# Altium footprint library CHIP-Library.PcbLib: 345 footprints (part 14 of 22)
Each footprint in its own frame and in the unit in brackets; x right, y up, seen from the top. Pads: shape width x height; smd on the part's side, far side on the other; paste and mask are expansions set on the pad; w line width, h text height; cw(c..) or ccw(c..) is an arc to the next point about the centre after c.
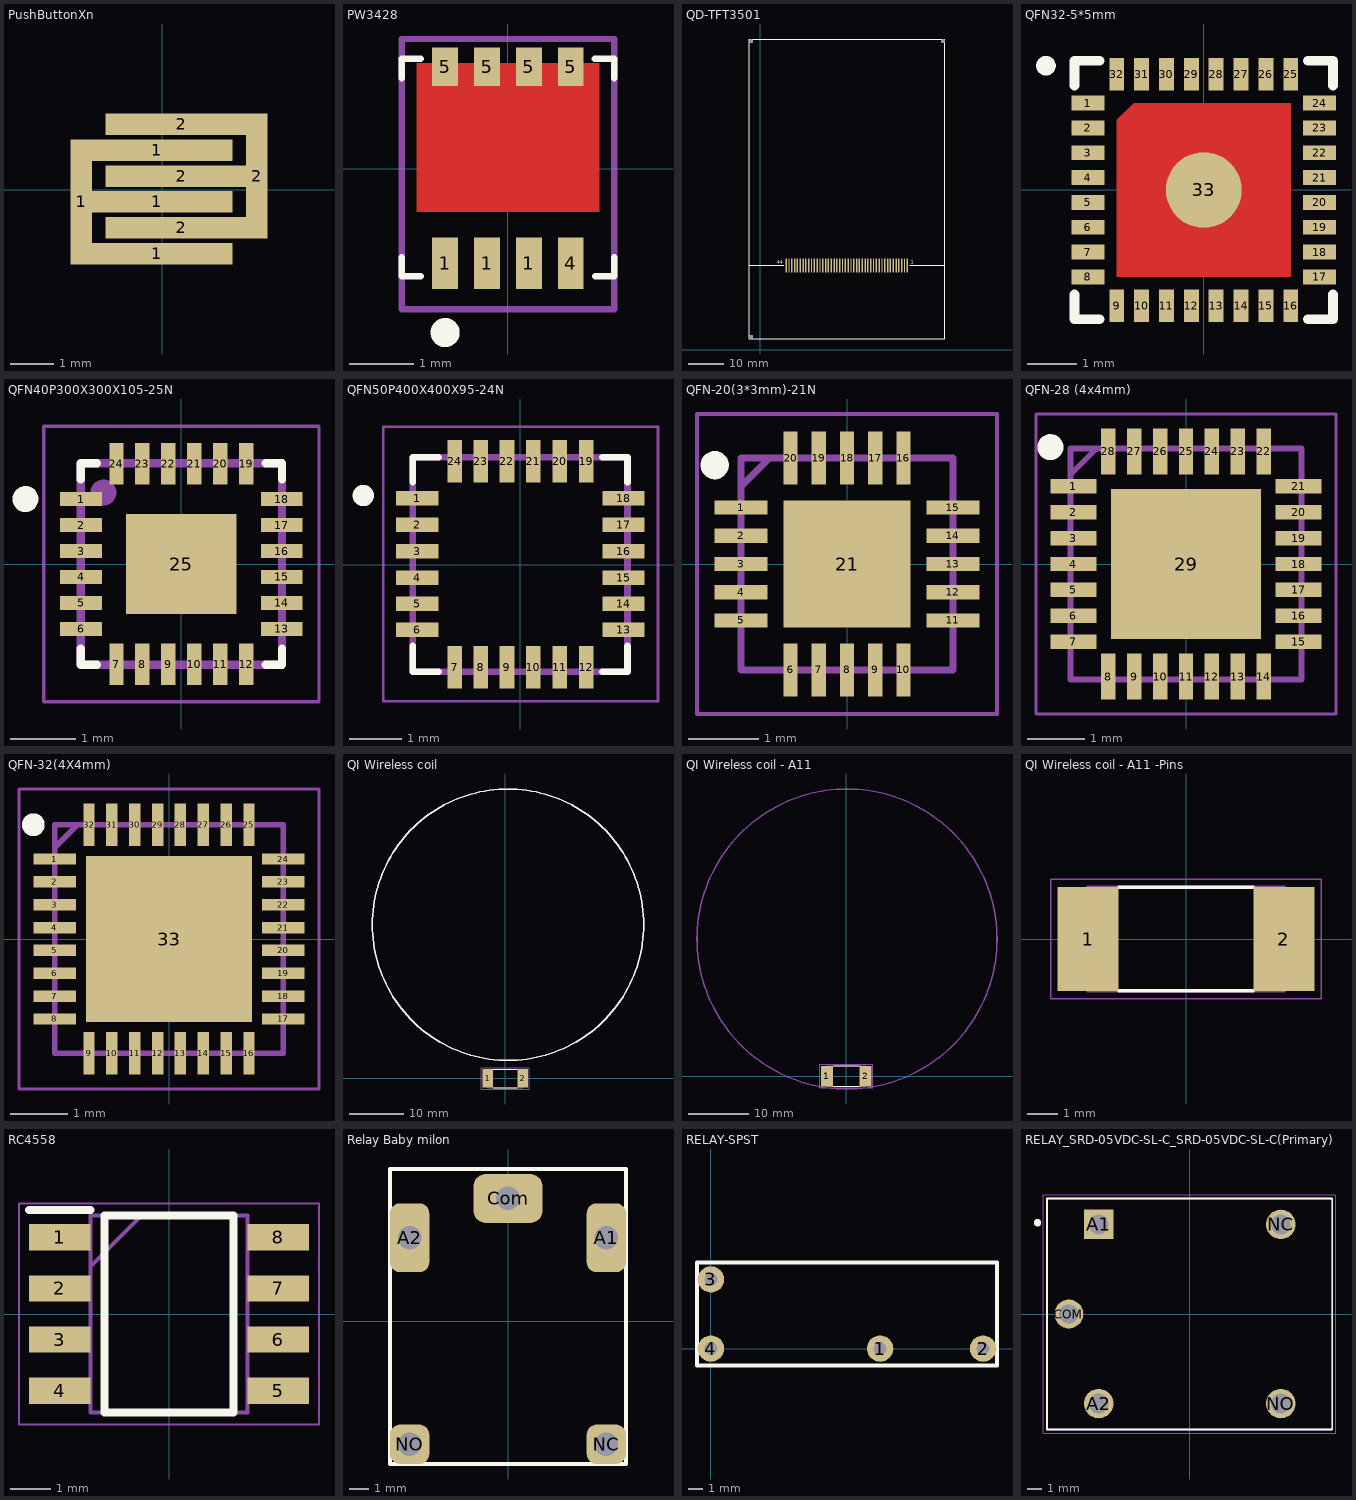
[diagram p13: the footprints below, top view; thin cyan lines are the x and y axes]

## PushButtonXn [mm]
pads (8):
  rect 0.5x2.9 smd: 1(-1.88,-0.285) 2(2.184,0.315)
  rect 3.5x0.5 smd: 1(-0.127,-1.486) 1(-0.127,-0.286) 1(-0.127,0.914) 2(0.432,-0.886) 2(0.432,0.314) 2(0.432,1.514)

## PW3428 [mm] "PDFN3X3-8"
pads (8):
  rect 0.4x0.8 smd: 1(-0.975,-1.465) 1(-0.325,-1.465) 1(0.325,-1.465) 4(0.975,-1.465)
  rect 0.4x0.6 smd: 5(-0.975,1.585) 5(-0.325,1.585) 5(0.325,1.585) 5(0.975,1.585)
Top Layer:
  region: -1.415,-0.665 1.415,-0.665 1.415,1.635 -1.415,1.635
Top Overlay:
  circle w0.25: c-0.975,-2.54 r0.1
  lines w0.1: -1.65,-1.368 -1.65,-1.668 -1.35,-1.668 ; -1.65,1.406 -1.65,1.706 -1.35,1.706 ; 1.35,1.706 1.65,1.706 1.65,1.406 ; 1.351,-1.668 1.651,-1.668 1.651,-1.368
Top Paste:
  region: 0.125,-0.664 1.415,-0.664 1.415,1.636 0.125,1.636
  region: -1.415,-0.665 -0.125,-0.665 -0.125,1.635 -1.415,1.635
Top Solder:
  region: 0.125,-0.664 1.415,-0.664 1.415,1.636 0.125,1.636
  region: -1.415,-0.665 -0.125,-0.665 -0.125,1.635 -1.415,1.635
Mechanical 15:
  lines w0.1: -1.65,-2.176 1.65,-2.176 1.65,2.015 -1.65,2.015 -1.65,-2.176
3D body "CSD17575Q3.STEP": height 1.1, standoff 0, extent -1.65,-1.65 1.65,1.65

## QD-TFT3501 [mm] "3.5inch TFT LCD"
pads (48):
  rect 0.4x4 smd: 1(40.905,23.975) 1(41.705,23.975) 3(40.105,23.975) 4(39.305,23.975) 5(38.505,23.975) 6(37.705,23.975) 7(36.905,23.975) 8(36.105,23.975) 9(35.305,23.975) 10(34.505,23.975) 11(33.705,23.975) 12(32.905,23.975) 13(32.105,23.975) 14(31.305,23.975) 15(30.505,23.975) 16(29.705,23.975) 17(28.905,23.975) 18(28.105,23.975) 19(27.305,23.975) 20(26.505,23.975) 21(25.705,23.975) 22(24.905,23.975) 23(24.105,23.975) 24(23.305,23.975) 25(22.505,23.975) 26(21.705,23.975) 27(20.905,23.975) 28(20.105,23.975) 29(19.305,23.975) 30(18.505,23.975) 31(17.705,23.975) 32(16.905,23.975) 33(16.105,23.975) 34(15.305,23.975) 35(14.505,23.975) 36(13.705,23.975) 37(12.905,23.975) 38(12.105,23.975) 39(11.305,23.975) 40(10.505,23.975) 41(9.705,23.975) 42(8.905,23.975) 43(8.105,23.975) 44(7.305,23.975) 44(7.305,23.975)
  round 1.2 hole 1.2 unplated mask+0: 9(-2.675,3.675) 9(-2.675,87.635) 9(51.825,87.635)
Top Overlay:
  lines w0.254: -3.147,23.975 6.604,23.975 ; 42.418,23.975 52.297,23.975 ; -3.175,3.175 -3.175,88.135 52.325,88.135 52.325,3.175 -3.175,3.175
  text "1" at 42.672,24.384 h1.02
  text "44" at 4.572,24.384 h1.02

## QFN32-5*5mm [mm]
pads (34):
  rect 0.66x0.3 smd mask+0.03: 1(-2.33,1.75) 2(-2.33,1.25) 3(-2.33,0.75) 4(-2.33,0.25) 5(-2.33,-0.25) 6(-2.33,-0.75) 7(-2.33,-1.25) 8(-2.33,-1.75) 17(2.33,-1.75) 18(2.33,-1.25) 19(2.33,-0.75) 20(2.33,-0.25) 21(2.33,0.25) 22(2.33,0.75) 23(2.33,1.25) 24(2.33,1.75)
  rect 0.3x0.66 smd mask+0.03: 9(-1.75,-2.33) 10(-1.25,-2.33) 11(-0.75,-2.33) 12(-0.25,-2.33) 13(0.25,-2.33) 14(0.75,-2.33) 15(1.25,-2.33) 16(1.75,-2.33) 25(1.75,2.33) 26(1.25,2.33) 27(0.75,2.33) 28(0.25,2.33) 29(-0.25,2.33) 30(-0.75,2.33) 31(-1.25,2.33) 32(-1.75,2.33)
  round 1.524 smd: 33(0,0)
  round 0.4 on Top Overlay: ""(-3.175,2.5)
Top Layer:
  region: -1.412,1.75 -1.75,1.412 -1.75,-1.75 1.75,-1.75 1.75,1.75
Top Overlay:
  lines w0.2: -2.6,-2.1 -2.6,-2.6 -2.1,-2.6 ; -2.6,2.1 -2.6,2.6 -2.1,2.6 ; 2.1,-2.6 2.6,-2.6 2.6,-2.1 ; 2.1,2.6 2.6,2.6 2.6,2.1
Top Paste:
  rectangle: -1.131,-1.462 -0.381,-0.762
  rectangle: 0.381,-1.462 1.131,-0.762
  rectangle: 0.381,-0.319 1.131,0.381
  rectangle: -1.131,-0.319 -0.381,0.381
  rectangle: 0.381,0.762 1.131,1.462
  rectangle: -1.131,0.762 -0.381,1.462
3D body: height 0.75, standoff 0, extent -2.5,-2.5 2.5,2.5

## QFN40P300X300X105-25N [mm]
pads (25):
  rect 0.64x0.22 smd: 1(-1.545,1) 2(-1.545,0.6) 3(-1.545,0.2) 4(-1.545,-0.2) 5(-1.545,-0.6) 6(-1.545,-1) 13(1.545,-1) 14(1.545,-0.6) 15(1.545,-0.2) 16(1.545,0.2) 17(1.545,0.6) 18(1.545,1)
  rect 0.22x0.64 smd: 7(-1,-1.545) 8(-0.6,-1.545) 9(-0.2,-1.545) 10(0.2,-1.545) 11(0.6,-1.545) 12(1,-1.545) 19(1,1.545) 20(0.6,1.545) 21(0.2,1.545) 22(-0.2,1.545) 23(-0.6,1.545) 24(-1,1.545)
  rect 1.7x1.54 smd: 25(0,0)
Top Overlay:
  circle w0.2: c-2.4,1 r0.1
  lines w0.127: -1.55,-1.3 -1.55,-1.55 -1.3,-1.55 ; -1.55,1.3 -1.55,1.55 -1.3,1.55 ; 1.3,-1.55 1.55,-1.55 1.55,-1.3 ; 1.3,1.55 1.55,1.55 1.55,1.3
Top Paste:
  region: -0.692,0.61 -0.08,0.61 -0.08,0.08 -0.692,0.08
  region: 0.08,0.61 0.69,0.61 0.69,0.08 0.08,0.08
  region: -0.692,-0.08 -0.08,-0.08 -0.08,-0.612 -0.692,-0.612
  region: 0.08,-0.08 0.69,-0.08 0.69,-0.612 0.08,-0.612
Mechanical 1:
  circle w0.2: c-1.2,1.1 r0.1
  lines w0.127: -1.55,-1.55 1.55,-1.55 1.55,1.55 -1.55,1.55 -1.55,-1.55
Mechanical 4:
  lines w0.05: -2.12,-2.12 2.12,-2.12 2.12,2.12 -2.12,2.12 -2.12,-2.12
3D body "User Library-MPU9250.step": height 1, standoff -0.05, extent -1.51,-1.51 1.51,1.51

## QFN50P400X400X95-24N [mil]
pads (24):
  rect 32x11 smd: 1(-77.56,50) 2(-77.56,30) 3(-77.56,10) 4(-77.56,-9.84) 5(-77.56,-29.53) 6(-77.56,-49.21) 13(78,-49.21) 14(78,-29.53) 15(78,-9.84) 16(78,10) 17(78,30) 18(78,50)
  rect 11x32 smd: 7(-49.21,-77.56) 8(-29.53,-77.56) 9(-9.84,-77.56) 10(10,-77.56) 11(30,-77.56) 12(50,-77.56) 19(50,78) 20(30,78) 21(10,78) 22(-9.84,78) 23(-29.53,78) 24(-49.21,78)
Top Overlay:
  circle w8: c-118.11,52 r4
  lines w5: -80.71,-61.42 -80.71,-80.71 -61.42,-80.71 ; -80.71,62 -80.71,81 -61.42,81 ; 62,-80.71 81,-80.71 81,-61.42 ; 62,81 81,81 81,62
Mechanical 4:
Mechanical 16:
  lines w5: -80.71,-80.71 -80.71,81 81,81 81,-80.71 -80.71,-80.71
Mechanical 27:
  lines w2: -103.15,-103.15 -103.15,104 104,104 104,-103.15 -103.15,-103.15

## QFN-20(3*3mm)-21N [mm]
pads (21):
  rect 0.75x0.2 smd: 1(-1.5,0.8) 2(-1.5,0.4) 3(-1.5,0) 4(-1.5,-0.4) 5(-1.5,-0.8) 11(1.5,-0.8) 12(1.5,-0.4) 13(1.5,0) 14(1.5,0.4) 15(1.5,0.8)
  rect 0.2x0.75 smd: 6(-0.8,-1.5) 7(-0.4,-1.5) 8(0,-1.5) 9(0.4,-1.5) 10(0.8,-1.5) 16(0.8,1.5) 17(0.4,1.5) 18(0,1.5) 19(-0.4,1.5) 20(-0.8,1.5)
  rect 1.8x1.8 smd: 21(0,0)
Top Overlay:
  circle w0.2: c-1.875,1.4 r0.1
Mechanical 15:
  lines w0.1: -1.5,1.1 -1.1,1.5 ; -1.5,-1.5 1.5,-1.5 1.5,1.5 -1.5,1.5 -1.5,-1.5
Mechanical 20:
  lines w0.05: -2.125,-2.125 2.125,-2.125 2.125,2.125 -2.125,2.125 -2.125,-2.125
3D body "QFN-20(3X3mm).stp": height 0.6, standoff 0, extent -1.55,-1.55 1.55,1.55

## QFN-28 (4x4mm) [mm]
pads (29):
  rect 0.8x0.25 smd: 1(-1.95,1.35) 2(-1.95,0.9) 3(-1.95,0.45) 4(-1.95,0) 5(-1.95,-0.45) 6(-1.95,-0.9) 7(-1.95,-1.35) 15(1.95,-1.35) 16(1.95,-0.9) 17(1.95,-0.45) 18(1.95,0) 19(1.95,0.45) 20(1.95,0.9) 21(1.95,1.35)
  rect 0.25x0.8 smd: 8(-1.35,-1.95) 9(-0.9,-1.95) 10(-0.45,-1.95) 11(0,-1.95) 12(0.45,-1.95) 13(0.9,-1.95) 14(1.35,-1.95) 22(1.35,1.95) 23(0.9,1.95) 24(0.45,1.95) 25(0,1.95) 26(-0.45,1.95) 27(-0.9,1.95) 28(-1.35,1.95)
  rect 2.6x2.6 smd: 29(0,0)
Top Overlay:
  circle w0.225: c-2.351,2.025 r0.112
Mechanical 15:
  lines w0.1: -2,1.55 -1.55,2 ; -2,-2 -2,2 2,2 2,-2 -2,-2
Mechanical 20:
  lines w0.05: -2.6,-2.6 -2.6,2.6 2.6,2.6 2.6,-2.6 -2.6,-2.6
3D body "QFN-28(4x4mm).stp": height 0.9, standoff 0, extent -2.05,-2.05 2.05,2.05

## QFN-32(4X4mm) [mm]
pads (33):
  rect 0.75x0.2 smd: 1(-2,1.4) 2(-2,1) 3(-2,0.6) 4(-2,0.2) 5(-2,-0.2) 6(-2,-0.6) 7(-2,-1) 8(-2,-1.4) 17(2,-1.4) 18(2,-1) 19(2,-0.6) 20(2,-0.2) 21(2,0.2) 22(2,0.6) 23(2,1) 24(2,1.4)
  rect 0.2x0.75 smd: 9(-1.4,-2) 10(-1,-2) 11(-0.6,-2) 12(-0.2,-2) 13(0.2,-2) 14(0.6,-2) 15(1,-2) 16(1.4,-2) 25(1.4,2) 26(1,2) 27(0.6,2) 28(0.2,2) 29(-0.2,2) 30(-0.6,2) 31(-1,2) 32(-1.4,2)
  rect 2.9x2.9 smd: 33(0,0)
Top Overlay:
  circle w0.2: c-2.375,2 r0.1
Mechanical 15:
  lines w0.1: -2,1.6 -1.6,2 ; -2,-2 -2,2 2,2 2,-2 -2,-2
Mechanical 20:
  lines w0.05: -2.625,-2.625 -2.625,2.625 2.625,2.625 2.625,-2.625 -2.625,-2.625

## QI Wireless coil [mm]
pads (2):
  rect 2x3.42 smd: 1(-3.22,0) 2(3.22,0)
Top Overlay:
  circle w0.254: c0.508,28.321 r25
  lines w0.127: -2.2,-1.7 2.2,-1.7 ; -2.2,1.7 2.2,1.7
Top Courtyard:
  circle w0.254: c0.508,28.321 r25
Mechanical 13:
  lines w0.127: -3.22,-1.7 3.22,-1.7 3.22,1.7 -3.22,1.7 -3.22,-1.7
Mechanical 15:
  lines w0.05: -4.445,-1.958 4.445,-1.958 4.445,1.958 -4.445,1.958 -4.445,-1.958
3D body "QI WIRELESS CHARGER COIL.STEP": height 2.72, standoff 0.01, extent -32.215,-4.783 32.052,59.483

## QI Wireless coil - A11 [mm]
pads (2):
  rect 2x3.42 smd: 1(-3.22,0) 2(3.22,0)
Top Overlay:
  lines w0.127: -2.2,-1.7 2.2,-1.7 ; -2.2,1.7 2.2,1.7
Top Courtyard:
  circle w0.254: c0.127,22.86 r25
Mechanical 13:
  lines w0.127: -3.22,-1.7 3.22,-1.7 3.22,1.7 -3.22,1.7 -3.22,-1.7
Mechanical 15:
  lines w0.05: -4.445,-1.958 4.445,-1.958 4.445,1.958 -4.445,1.958 -4.445,-1.958
3D body "QI WIRELESS CHARGER COIL.STEP": height 2.72, standoff 0.01, extent -32.157,-8.488 32.11,55.779

## QI Wireless coil - A11 -Pins [mm]
pads (2):
  rect 2x3.42 smd: 1(-3.22,0) 2(3.22,0)
Top Overlay:
  lines w0.127: -2.2,-1.7 2.2,-1.7 ; -2.2,1.7 2.2,1.7
Mechanical 13:
  lines w0.127: -3.22,-1.7 3.22,-1.7 3.22,1.7 -3.22,1.7 -3.22,-1.7
Mechanical 15:
  lines w0.05: -4.445,-1.958 4.445,-1.958 4.445,1.958 -4.445,1.958 -4.445,-1.958

## RC4558 [mm]
pads (8):
  rect 1.525x0.65 smd: 1(-2.712,1.905) 2(-2.712,0.635) 3(-2.712,-0.635) 4(-2.712,-1.905) 5(2.712,-1.905) 6(2.712,-0.635) 7(2.712,0.635) 8(2.712,1.905)
Top Overlay:
  lines w0.2: -3.475,2.58 -1.95,2.58 ; -1.6,-2.45 1.6,-2.45 1.6,2.45 -1.6,2.45 -1.6,-2.45
Mechanical 13:
  lines w0.1: -1.95,1.18 -0.68,2.45 ; -1.95,-2.45 1.95,-2.45 1.95,2.45 -1.95,2.45 -1.95,-2.45
Mechanical 15:
  lines w0.05: -3.725,-2.75 3.725,-2.75 3.725,2.75 -3.725,2.75 -3.725,-2.75
3D body "FR9886SOGTR.stp": height 1.75, standoff 0, extent -3,-2.45 3,2.45

## Relay Baby milon [mm] "relay baby milon 12v"
height 1.91
pads (5):
  rrect50% 2x3.5 hole 1.2: A1(5,4.25) A2(-5,4.25)
  rrect50% 3.5x2.5 hole 1.2: Com(0,6.25)
  rrect50% 2x2 hole 1.2: NC(5,-6.25) NO(-5,-6.25)
Top Overlay:
  lines w0.2: -6,-7.25 -6,7.75 6,7.75 6,-7.25 -6,-7.25
3D body "User Library-T74 4181.STEP": height 13.71, standoff -3.89, extent -6.131,-7.583 6.169,8.117

## RELAY-SPST [mm]
height 0.55
pads (4):
  round 1.8 hole 0.9: 1(11.5,0) 2(18.5,0) 3(0,4.7) 4(0,0)
Top Overlay:
  lines w0.254: -0.95,-1.15 19.45,-1.15 19.45,5.85 -0.95,5.85 -0.95,-1.15
3D body "role.STEP": height 14.91, standoff -3.39, extent -0.979,-1.187 19.521,6.013

## RELAY_SRD-05VDC-SL-C_SRD-05VDC-SL-C(Primary) [mm]
pads (5):
  rect 1.98x1.98 hole 1.32: A1(-6.1,6)
  round 1.98 hole 1.32: A2(-6.1,-6) NC(6.1,6) NO(6.1,-6)
  round 1.935 hole 1.29: COM(-8.1,0)
Top Overlay:
  circle w0.3: c-10.2,6.119 r0.1
  lines w0.127: -9.55,-7.75 9.55,-7.75 9.55,7.75 -9.55,7.75 -9.55,-7.75
Mechanical 4:
  lines w0.127: -9.55,-7.75 9.55,-7.75 ; -9.55,-7.75 -9.55,7.75 ; -9.55,-7.75 9.55,-7.75 ; -9.55,-7.75 -9.55,7.75 ; -9.55,7.75 9.55,7.75 ; -9.55,7.75 9.55,7.75 ; 9.55,-7.75 9.55,7.75 ; 9.55,-7.75 9.55,7.75
Mechanical 16:
  lines w0.05: -9.8,-8 9.8,-8 9.8,8 -9.8,8 -9.8,-8
3D body "SRD-05VDC-SL-C--3DModel-STEP-184599.STEP": height 16.15, standoff -4, extent -10.11,-7.5 8.89,7.5